# Altium footprint library LM5148QRGYRQ1.PcbLib: 1 footprints
Each footprint in its own frame and in the unit in brackets; x right, y up, seen from the top. Pads: shape width x height; smd on the part's side, far side on the other; paste and mask are expansions set on the pad; w line width, h text height; cw(c..) or ccw(c..) is an arc to the next point about the centre after c.
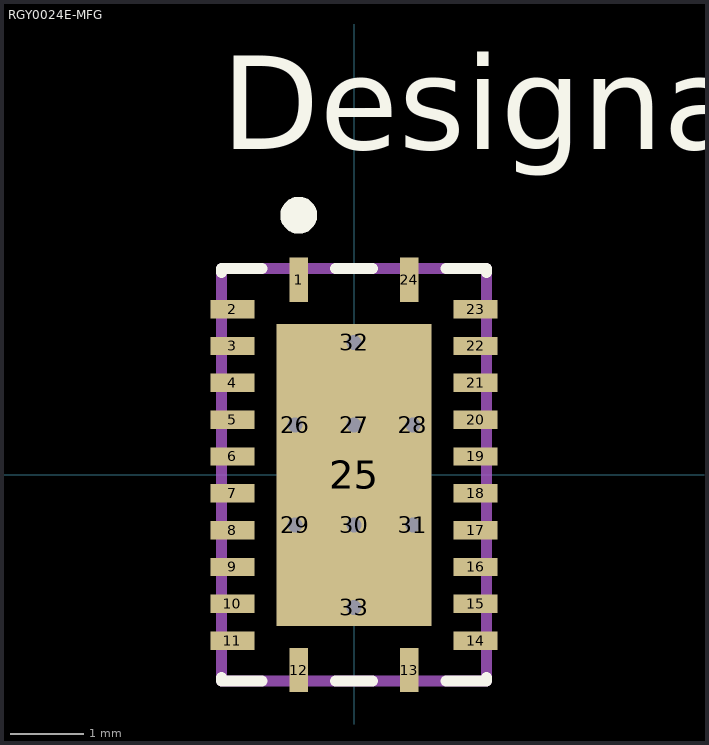
[diagram p0: the footprint, top view; thin cyan lines are the x and y axes]

## RGY0024E-MFG [mm]
pads (33):
  rect 0.25x0.6 smd paste+0 mask+0: 1(-0.75,2.65) 12(-0.75,-2.65) 13(0.75,-2.65) 24(0.75,2.65)
  rect 0.6x0.25 smd paste+0 mask+0: 2(-1.65,2.25) 3(-1.65,1.75) 4(-1.65,1.25) 5(-1.65,0.75) 6(-1.65,0.25) 7(-1.65,-0.25) 8(-1.65,-0.75) 9(-1.65,-1.25) 10(-1.65,-1.75) 11(-1.65,-2.25) 14(1.65,-2.25) 15(1.65,-1.75) 16(1.65,-1.25) 17(1.65,-0.75) 18(1.65,-0.25) 19(1.65,0.25) 20(1.65,0.75) 21(1.65,1.25) 22(1.65,1.75) 23(1.65,2.25)
  rect 2.1x4.1 smd paste-2.037 mask+0: 25(0,0)
  round 0.5 hole 0.203 paste-0.25 mask-0.241: 26(-0.8,0.68) 27(0,0.68) 28(0.8,0.68) 29(-0.8,-0.68) 30(0,-0.68) 31(0.8,-0.68) 32(0,1.8) 33(0,-1.8)
Top Overlay:
  circle w0.25: c-0.75,3.525 r0.125
  lines w0.15: -1.8,-2.75 -1.8,-2.8 -1.25,-2.8 ; -1.8,2.75 -1.8,2.8 -1.25,2.8 ; -0.25,-2.8 0.25,-2.8 ; -0.25,2.8 0.25,2.8 ; 1.25,-2.8 1.8,-2.8 1.8,-2.75 ; 1.25,2.8 1.8,2.8 1.8,2.75
  text "Designator67" at -1.803,4.42 h1.27
  text ".Designator" at -3.492,-0.635 h1.27
Top Paste:
  region: -0.1,1.89 -0.1,0.83 -0.15,0.78 -0.99,0.78 -1.04,0.83 -1.04,1.89 -0.99,1.94 -0.15,1.94
  region: -0.1,-0.53 -0.15,-0.58 -0.99,-0.58 -1.04,-0.53 -1.04,0.53 -0.99,0.58 -0.15,0.58 -0.1,0.53
  region: -0.15,-1.94 -0.99,-1.94 -1.04,-1.89 -1.04,-0.83 -0.99,-0.78 -0.15,-0.78 -0.1,-0.83 -0.1,-1.89
  region: 0.15,0.78 0.1,0.83 0.1,1.89 0.15,1.94 0.99,1.94 1.04,1.89 1.04,0.83 0.99,0.78
  region: 1.04,0.53 1.04,-0.53 0.99,-0.58 0.15,-0.58 0.1,-0.53 0.1,0.53 0.15,0.58 0.99,0.58
  region: 0.1,-1.89 0.1,-0.83 0.15,-0.78 0.99,-0.78 1.04,-0.83 1.04,-1.89 0.99,-1.94 0.15,-1.94
Mechanical 13:
  lines w0.15: -1.8,-2.8 1.8,-2.8 1.8,2.8 -1.8,2.8 -1.8,-2.8
  text ".Designator" at -3.492,-0.635 h1.27